# EAGLE library part IC_UC_ATMEGA328P-MU (library dp_devices.v6)
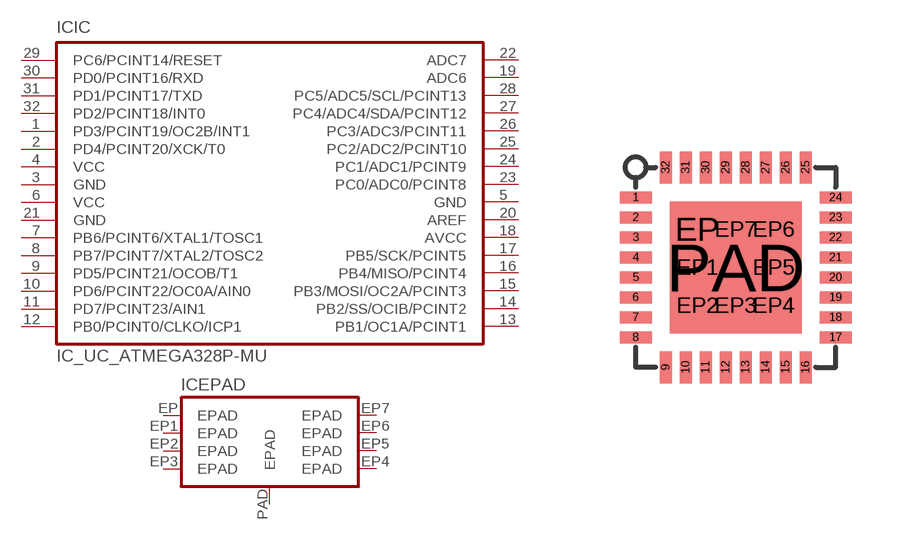
[diagram p165: symbol with the pads of QFN32_5X5; footprint QFN32_5X5]

Designator prefix IC; gates IC=ATMEGA328P-AU EPAD=PAD-GND-9

## IC_UC_ATMEGA328P-MU  [QFN32_5X5]
1  IC:PD3/PCINT19/OC2B/INT1
2  IC:PD4/PCINT20/XCK/T0
3  IC:GND
4  IC:VCC
5  IC:GND
6  IC:VCC
7  IC:PB6/PCINT6/XTAL1/TOSC1
8  IC:PB7/PCINT7/XTAL2/TOSC2
9  IC:PD5/PCINT21/OCOB/T1
10  IC:PD6/PCINT22/OC0A/AIN0
11  IC:PD7/PCINT23/AIN1
12  IC:PB0/PCINT0/CLKO/ICP1
13  IC:PB1/OC1A/PCINT1
14  IC:PB2/SS/OCIB/PCINT2
15  IC:PB3/MOSI/OC2A/PCINT3
16  IC:PB4/MISO/PCINT4
17  IC:PB5/SCK/PCINT5
18  IC:AVCC
19  IC:ADC6
20  IC:AREF
21  IC:GND
22  IC:ADC7
23  IC:PC0/ADC0/PCINT8
24  IC:PC1/ADC1/PCINT9
25  IC:PC2/ADC2/PCINT10
26  IC:PC3/ADC3/PCINT11
27  IC:PC4/ADC4/SDA/PCINT12
28  IC:PC5/ADC5/SCL/PCINT13
29  IC:PC6/PCINT14/RESET
30  IC:PD0/PCINT16/RXD
31  IC:PD1/PCINT17/TXD
32  IC:PD2/PCINT18/INT0
EP  EPAD:EPAD  pwr
EP1  EPAD:EPAD  pwr
EP2  EPAD:EPAD  pwr
EP3  EPAD:EPAD  pwr
EP4  EPAD:EPAD  pwr
EP5  EPAD:EPAD  pwr
EP6  EPAD:EPAD  pwr
EP7  EPAD:EPAD  pwr
PAD  EPAD:EPAD  pwr

## Footprint QFN32_5X5 (pad centres in mm)
smd 0.8 x 0.3: 1 -2.5,1.75; 2 -2.5,1.25; 3 -2.5,0.75; 4 -2.5,0.25; 5 -2.5,-0.25; 6 -2.5,-0.75; 7 -2.5,-1.25; 8 -2.5,-1.75; 17 2.5,-1.75; 18 2.5,-1.25; 19 2.5,-0.75; 20 2.5,-0.25; 21 2.5,0.25; 22 2.5,0.75; 23 2.5,1.25; 24 2.5,1.75
smd 0.3 x 0.8: 9 -1.75,-2.5; 10 -1.25,-2.5; 11 -0.75,-2.5; 12 -0.25,-2.5; 13 0.25,-2.5; 14 0.75,-2.5; 15 1.25,-2.5; 16 1.75,-2.5; 25 1.75,2.5; 26 1.25,2.5; 27 0.75,2.5; 28 0.25,2.5; 29 -0.25,2.5; 30 -0.75,2.5; 31 -1.25,2.5; 32 -1.75,2.5
drill 0.381: EP -0.953,0.953; EP1 -0.953,0; EP2 -0.953,-0.953; EP3 0,-0.953; EP4 0.953,-0.953; EP5 0.953,0; EP6 0.953,0.953; EP7 0,0.953
smd 3.3 x 3.3: PAD 0,0